# Altium schematic symbol library Connectors-LIB-SCH.SchLib: 36 symbols
Pins are listed as number, name and electrical type; pins without a type are passive.

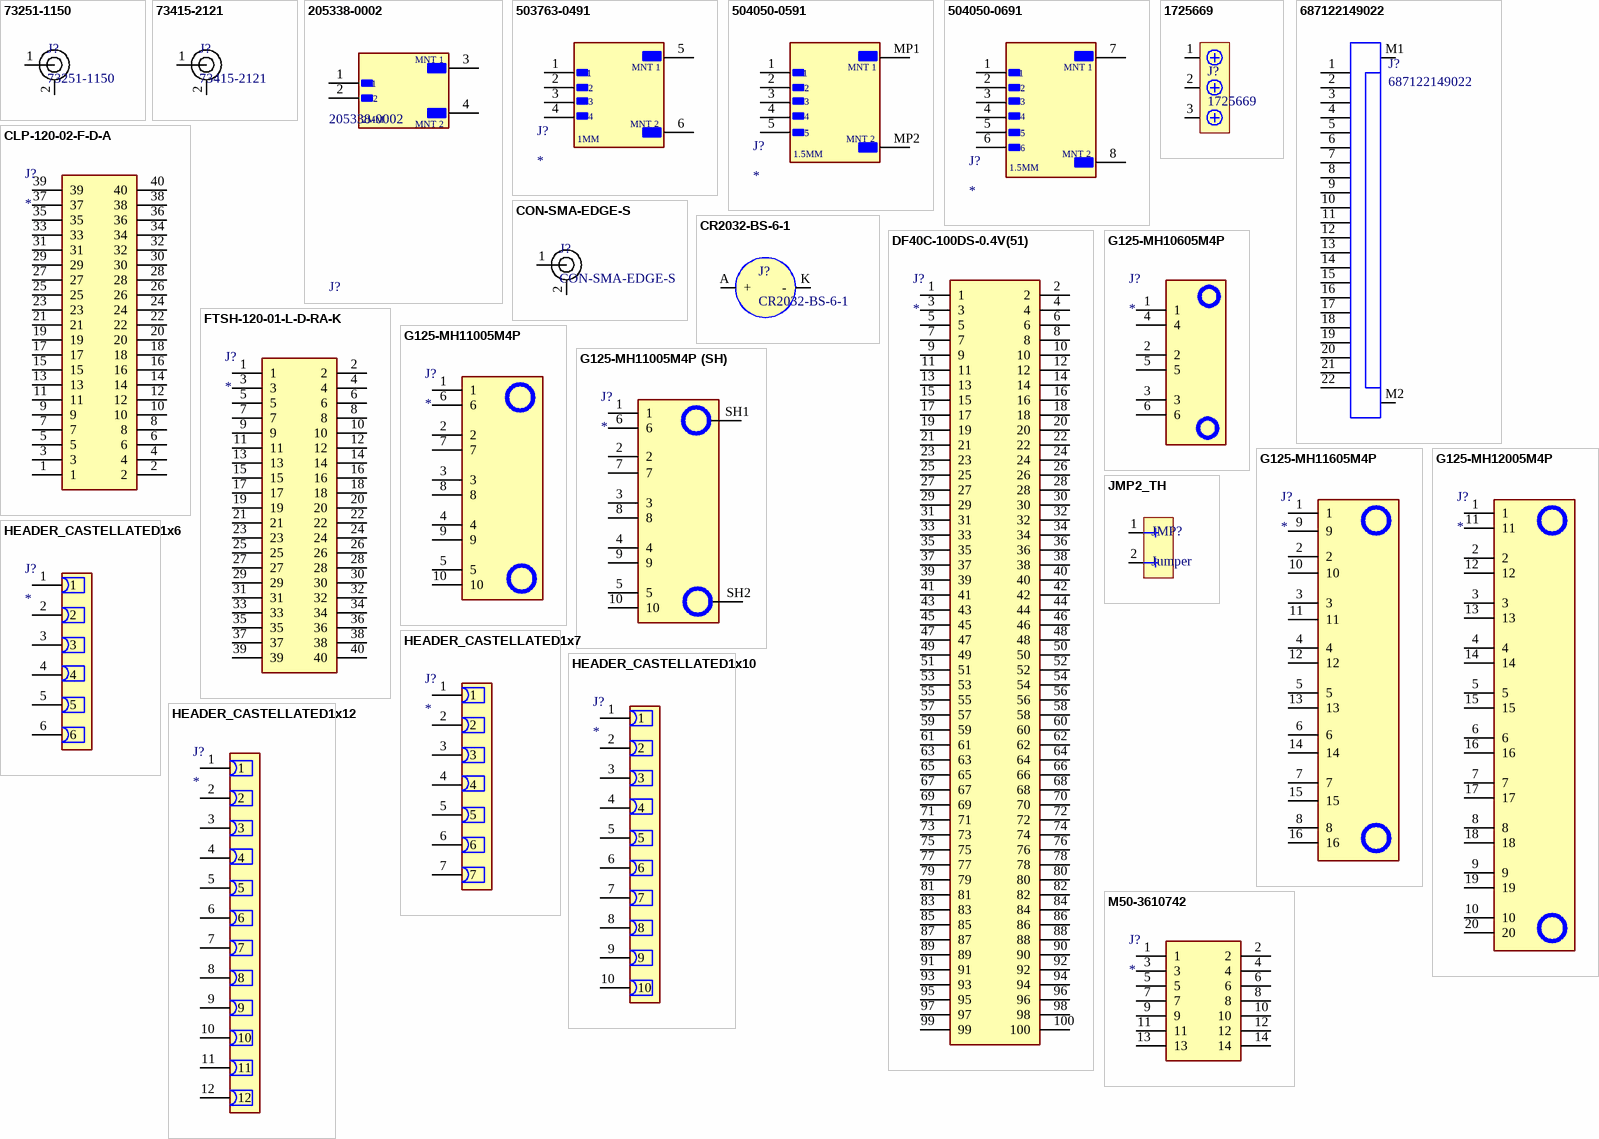
[diagram p0: symbols 73251-1150 to M50-3610742]

## 73251-1150
designator J?
RF Connector 50 Ohms, SMA Jack Receptacle, Edge Mount, .25µm Gold (Au) Plating; Manufacturer: Molex; Manufacturer Part Number: 73251-1150
footprint 73251-1150
pins: 1, 2

## 73415-2121
designator J?
RF Connector 50 Ohms, MMCX Vertical Plug, PCB, Plating Per Commercial Requirements, Bulk; Manufacturer: Molex; Manufacturer Part Number: 73415-2121
footprint 73415-2121
pins: 1, 2

## 205338-0002
designator J?
2.00 mm Pico-Lock Header, Surface-Mount, Right-Angle, Positive Lock, 2 Circuits (2 Positions); Manufacturer: Molex; Current Rating: 6.5A; Est Price INR: 163.37; Population Status: YES; Datasheet Link: https://www.molex.com/en-us/products/part-detail/2053380002?display=pdf; Height: 2.6mm; Manufacturer Part Number: 205338-0002; Package: SMD; Supplier Part Number: 538-205338-0002; Supplier: Mouser; Temperature Range: -40 to 105; Weight: 198.280 mg
footprint FP-205338-0002-MFG
pins: 1, 2, 3 MNT 1, 4 MNT 2
text: 2MM

## 503763-0491
designator J?
1.00 mm Pico-Lock Wire-to-Board Plug, Right-Angle, 4 Circuits (4 Positions), Positive Side Locking; Manufacturer: Molex; Manufacturer Part Number: 503763-0491; Est Price INR: 98.41; Population Status: YES; Current Rating: 1.5A; Datasheet Link: https://www.molex.com/webdocs/datasheets/pdf/en-us/5037630491_PCB_HEADERS.pdf; Height: 1.6mm; Supplier Part Number: 538-503763-0491; Package: SMD; Supplier: Mouser; Temperature Range: -40 to 105; Weight: 76.240 mg
footprint 5037630491
pins: 1, 2, 3, 4, 5, 6
text: MNT 1; MNT 2; 1MM

## 504050-0591
designator J?
1.50 mm Pico-Lock Header, Surface-Mount, Right-Angle, Positive Lock, 5 Circuits (5 Positions); Manufacturer: Molex; Manufacturer Part NUmber: 504050-0591; Current Rating: 2A; Est Price INR: 131.85; Population Status: YES; Datasheet Link: https://www.molex.com/pdm_docs/sd/5040500591_sd.pdf; Height: 2.15mm; Supplier Part Number: 538-504050-0591; Package: SMD; Supplier: Mouser; Temperature Range: -40 to 105; Weight: 143mg
footprint 5040500591
pins: 1, 2, 3, 4, 5, MP1 MP_1, MP2 MP_2
text: MNT 1; MNT 2; 1.5MM

## 504050-0691
designator J?
1.50 mm Pico-Lock Wire-to-Board Header Assembly, Embossed Tape Packaging, 6 Circuits (6 Positions); Manufacturer: Molex; Manufacturer Part NUmber: 504050-0691; Description: Pico-Lock SMT Wire-to-Board Header 6 way Molex Pico-Lock Series; Current Rating: 3A; Est Price INR: 144.27; Population Status: YES; Datasheet Link: https://www.molex.com/content/dam/molex/molex-dot-com/products/automated/en-us/salesdrawingpdf/504/504050/5040500691_sd.pdf?inline; Height: 2.15mm; Supplier Part Number: 538-504050-0691; Package: SMD; Supplier: Mouser; Temperature Range: -40 to 105; Weight: 3g
footprint 5040500691
pins: 1, 2, 3, 4, 5, 6, 7 MP_1, 8 MP_2
text: MNT 1; MNT 2; 1.5MM

## 1725669
designator J?
Screw Terminal Block 3 Positions 2.54mm; Manufacturer: Phoenix; Manufacturer Part Number: 1725669
footprint 1725669
pins: 1, 2, 3

## 687122149022
designator J?
22 Position FFC, FPC Connector Contacts, Bottom 0.020" (0.50mm) Surface Mount, Right Angle; Manufacturer: Wurth Elektronik; Current Rating: 500mA; Est Price INR: 159.34; Population Status: YES; Datasheet Link: https://www.we-online.com/components/products/datasheet/687122149022.pdf; Manufacturer Part Number: 687122149022; Package: SMD Horizontal 0.5mm 22Pos; Supplier Part Number: 710-687122149022; Supplier: Mouser; Temperature Range: -40 to 105; Weight: 341mg
footprint 687122149022 (0.50mm SMT ZIF Horizontal Hinge Type Bottom Contact, 22p)
pins: 1, 2, 3, 4, 5, 6, 7, 8, 9, 10, 11, 12, 13, 14, 15, 16, 17, 18, 19, 20, 21, 22, M1, M2

## CLP-120-02-F-D-A
designator J?
Connector; Manufacturer: SAMTEC; Manufacturer Part Number: CLP-120-02-F-D-A; Datasheet Link: http://suddendocs.samtec.com/prints/erm8-xxx-xx.x-xxx-dv-xxxx-xx-mkt.pdf; Height: 2.37mm; Supplier Part Number: 200-CLP12002FDA
footprint CLP-120-02-XXX-D-A
pins: 1, 2, 3, 4, 5, 6, 7, 8, 9, 10, 11, 12, 13, 14, 15, 16, 17, 18, 19, 20, 21, 22, 23, 24, 25, 26, 27, 28, 29, 30, 31, 32, 33, 34, 35, 36, 37, 38, 39, 40

## CON-SMA-EDGE-S
designator J?
RF Connector SMA Female 50 Ohms 18 GHz PCB Edge Mount; Manufacturer: RF Solutions; Manufacturer Part Number: CON-SMA-EDGE-S
footprint CON-SMA-EDGE-S
pins: 1, 2

## CR2032-BS-6-1
designator J?
CR2032 Coin Cell Battery Holder; Manufacturer: Q&J; Manufacturer Part Number: CR2032-BS-6-1
footprint CR2032
pins: A +, K -

## DF40C-100DS-0.4V(51)
designator J?
Board to Board & Mezzanine Connectors 100P SMT RECEPTACLE NO FITTING, NO BOSS; Manufacturer: Hirose; Manufacturer Part Number: DF40C-100DS-0.4V(51); Current Rating: 320mA; Population Status: YES; Est Price INR: 197.54; Datasheet Link: https://datasheet.datasheetarchive.com/originals/distributors/SFDatasheet-7/sf-000141247.pdf; Supplier Part Number: 798-DF40C100DS0.4V51; Package: 100Pos 0.4mm Pitch; Supplier: Mouser; Temperature Range: -35 to 85; Weight: 0.12g; Height: 1.45mm
footprint DF40C100DS04V51 (Footprint not found)
pins: 1, 2, 3, 4, 5, 6, 7, 8, 9, 10, 11, 12, 13, 14, 15, 16, 17, 18, 19, 20, 21, 22, 23, 24, 25, 26, 27, 28, 29, 30, 31, 32, 33, 34, 35, 36, 37, 38, 39, 40, 41, 42, 43, 44, 45, 46, 47, 48, 49, 50, 51, 52, 53, 54, 55, 56, 57, 58, 59, 60, 61, 62, 63, 64, 65, 66, 67, 68, 69, 70, 71, 72, 73, 74, 75, 76, 77, 78, 79, 80, 81, 82, 83, 84, 85, 86, 87, 88, 89, 90, 91, 92, 93, 94, 95, 96, 97, 98, 99, 100

## FTSH-120-01-L-D-RA-K
designator J?
Header Strips, .050" pitch; Manufacturer: SAMTEC; Manufacturer Part Number: FTSH-120-01-L-D-RA-K; Datasheet Link: http://suddendocs.samtec.com/prints/ftsh-1xx-xx-xxx-dv-xxx-xxx-mkt.pdf; Supplier Part Number: 200-FTSH12001LDRAK
footprint FTSH-120-XX-YYY-D-RA-K
pins: 1, 2, 3, 4, 5, 6, 7, 8, 9, 10, 11, 12, 13, 14, 15, 16, 17, 18, 19, 20, 21, 22, 23, 24, 25, 26, 27, 28, 29, 30, 31, 32, 33, 34, 35, 36, 37, 38, 39, 40

## G125-MH10605M4P
designator J?
Connector Header Through Hole, Right Angle 6 position 0.049" (1.25mm); Manufacturer: Harwin; Manufacturer Part Number: G125-MH10605M4P; Est Price INR: 1724.76; Population Status: YES; Current Rating: 2A; Datasheet Link: https://content.harwin.com/m/667f1be9427fb768/original/DRG-02921-Technical-Drawing-Datasheet-G125-MH1XX05M4P-pdf.pdf; Height: 5.3mm; Supplier Part Number: 855-G125MH1065M4PM4P; Package: TH 1.27mm 6Pos; Supplier: Mouser; Temperature Range: -60 to 150; Weight: 1.246g
footprint G125-MH10605M4P_1
pins: 1, 2, 3, 4, 5, 6

## G125-MH11005M4P
designator J?
Connector; Manufacturer: Harwin; Manufacturer Part Number: G125-MH11005M4P; Est Price INR: 2249.37; Population Status: YES; Current Rating: 2A; Datasheet Link: https://content.harwin.com/m/dde372ac2f9348fc/original/DRG-02922-Technical-Drawing-Datasheet-G125-MH1XX05M4R-pdf.pdf; Height: 5.3mm; Supplier Part Number: 855-G125MH1105M4PM4P; Package: 1.25mm TH 2x5pin; Supplier: Mouser; Temperature Range: -65 to 150; Weight: 1.344g
footprint G125-MH11005M4P_1
pins: 1, 2, 3, 4, 5, 6, 7, 8, 9, 10

## G125-MH11005M4P (SH)
designator J?
Connector; Manufacturer: Harwin; Manufacturer Part Number: G125-MH11605M4R; Datasheet Link: https://content.harwin.com/m/dde372ac2f9348fc/original/DRG-02922-Technical-Drawing-Datasheet-G125-MH1XX05M4R-pdf.pdf; Height: 5.3mm; Supplier Part Number: 855-G125MH1165M4RM4R
footprint G125-MH11005M4P_SH
pins: 1, 2, 3, 4, 5, 6, 7, 8, 9, 10, SH1, SH2

## G125-MH11605M4P
designator J?
Headers & Wire Housings Gecko-SL 8+8 Pos. Male Plug DIL Right-Angle 3.2mm THT Connector, Screw-Lok Board Mount; Manufacturer: Harwin; Manufacturer Part Number: G125-MH11605M4P; Est Price INR: 2402.18; Population Status: YES; Current Rating: 2A; Datasheet Link: https://content.harwin.com/m/dde372ac2f9348fc/original/DRG-02922-Technical-Drawing-Datasheet-G125-MH1XX05M4P-pdf.pdf; Height: 5.3mm; Supplier Part Number: 855-G125MH1165M4PM4P; Package: 1.25mm TH 2x8Pin; Supplier: Mouser; Temperature Range: -65 to 150; Weight: 1.49g
footprint G125-MH11605M4R
pins: 1, 2, 3, 4, 5, 6, 7, 8, 9, 10, 11, 12, 13, 14, 15, 16

## G125-MH12005M4P
designator J?
Connector Header Through Hole, Right Angle 20 position 0.049" (1.25mm); Manufacturer: Harwin; Manufacturer Part Number: G125-MH12005M4P; Est Price INR: 2428.27; Population Status: YES; Current Rating: 2A; Datasheet Link: https://content.harwin.com/m/667f1be9427fb768/original/DRG-02921-Technical-Drawing-Datasheet-G125-MH1XX05M4P-pdf.pdf; Height: 5.3mm; Supplier Part Number: 855-G125MH1205M4PM4P; Package: 1.27mm TH 2x10Pin; Supplier: Mouser; Temperature Range: -65 to 150; Weight: 1.587g
footprint G125-MH12005M4P_1
pins: 1, 2, 3, 4, 5, 6, 7, 8, 9, 10, 11, 12, 13, 14, 15, 16, 17, 18, 19, 20

## HEADER_CASTELLATED1x6
designator J?
Castellated Header 1x6 pins 2.54mm Pitch; Package: 2.54mm 1x6pins
footprint HEADER_CASTELLATED_1x6 (Footprint not found)
pins: 1, 2, 3, 4, 5, 6

## HEADER_CASTELLATED1x7
designator J?
Castellated Header 1x7 pins 2.54mm Pitch; Package: 2.54mm 1x7pins
footprint HEADER_CASTELLATED_1x7
pins: 1, 2, 3, 4, 5, 6, 7

## HEADER_CASTELLATED1x10
designator J?
Castellated Header 1x10 pins 2.54mm Pitch; Package: 2.54mm 1x10pins
footprint HEADER_CASTELLATED_1x10
pins: 1, 2, 3, 4, 5, 6, 7, 8, 9, 10

## HEADER_CASTELLATED1x12
designator J?
Castellated Header 1x10 pins 2.54mm Pitch; Package: 2.54mm 1x10pins
footprint HEADER_CASTELLATED_1x12
pins: 1, 2, 3, 4, 5, 6, 7, 8, 9, 10, 11, 12

## JMP2_TH
designator JMP?, comment Jumper
Jumper 2 Pins Through-Hole DO NOT PLACE
footprint JMP2_TH
pins: 1, 2

## M50-3610742
designator J?
Connector; Manufacturer: Harwin; Manufacturer Part Number: M50-3610742; Datasheet Link: https://content.harwin.com/m/023beacb372da894/original/DRG-00659-Technical-Drawing-Datasheet-M50-361-pdf.pdf; Height: 4.68mm; Supplier Part Number: 855-M50-3610742
footprint M50-3610742 (Footprint not found)
pins: 1, 2, 3, 4, 5, 6, 7, 8, 9, 10, 11, 12, 13, 14

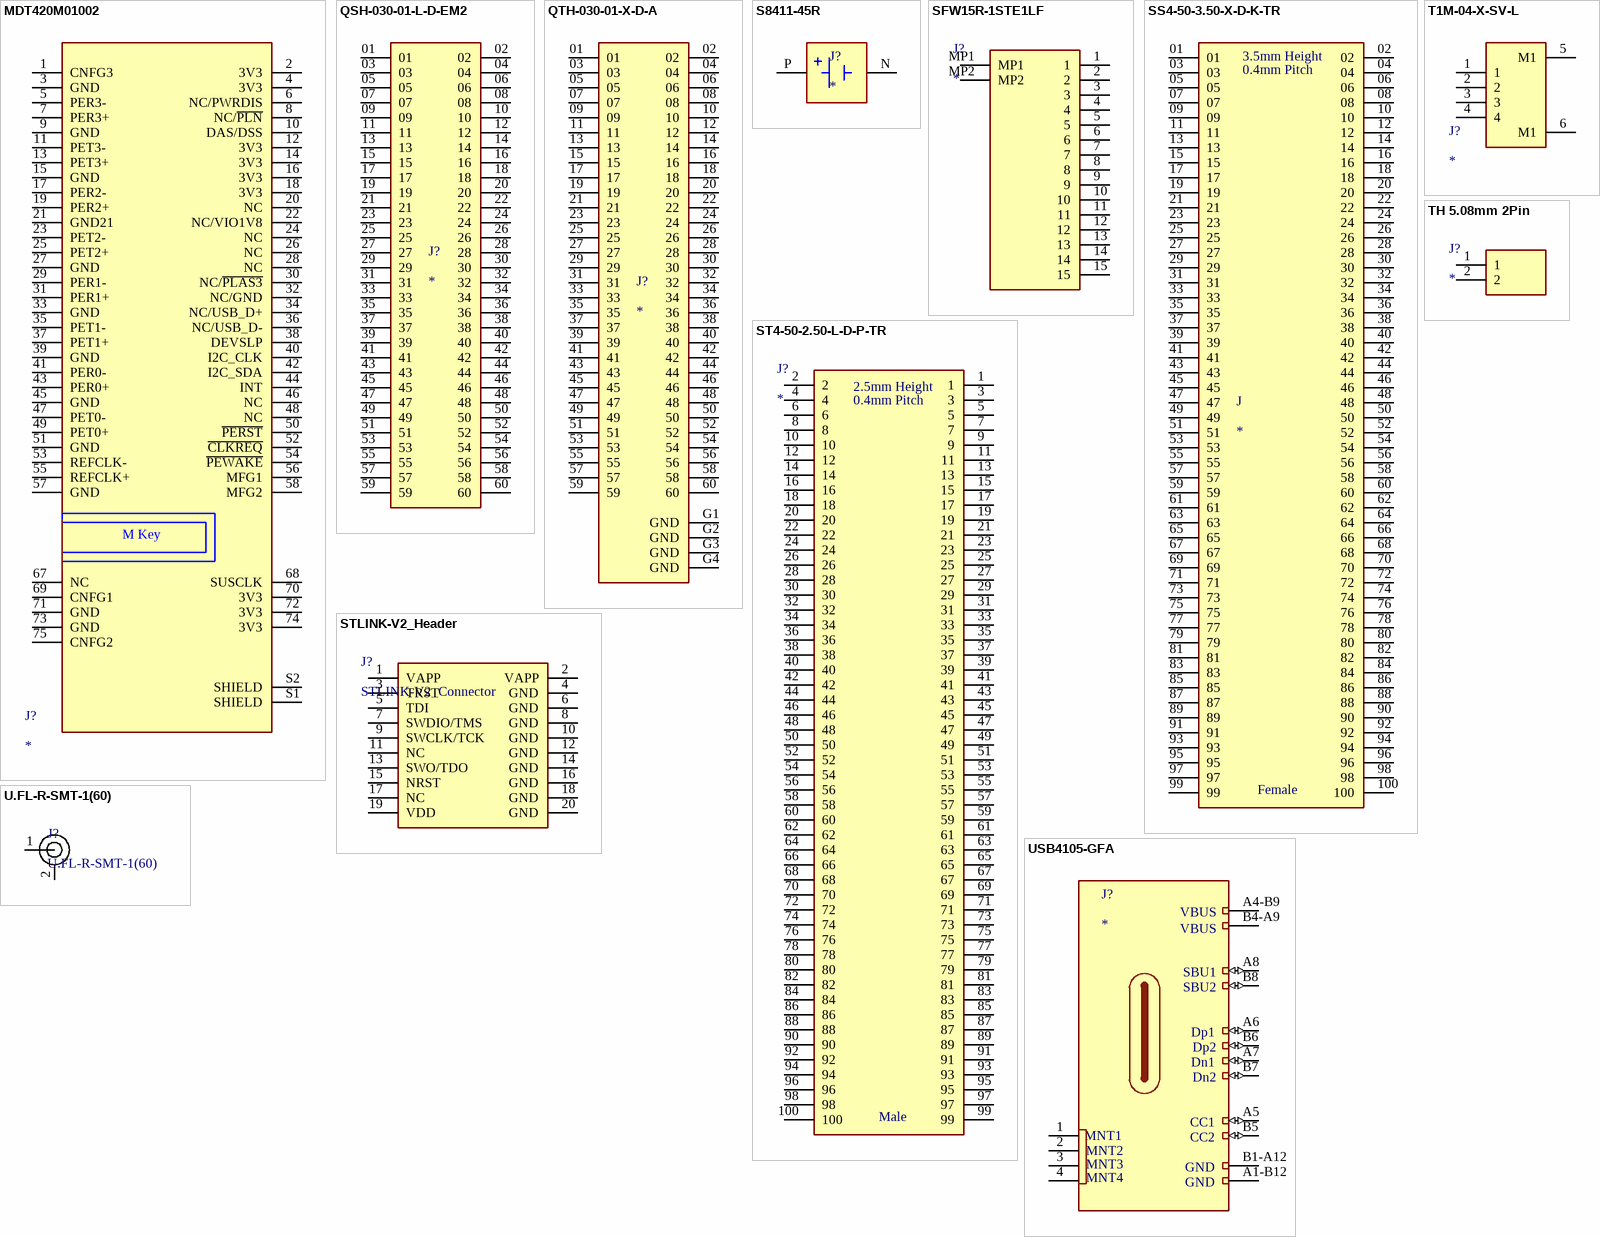
[diagram p1: symbols MDT420M01002 to USB4105-GFA]

## MDT420M01002
designator J?
67 Position Female Connector M.2 (NGFF) Mini Card Gold 0.020" (0.50mm) Black; Manufacturer Part Number: MDT420M01002; Manufacturer: Amphenol FCI; Current Rating: 500mA; Est Price INR: 250.65; Population Status: YES; Package: M.2 (NGFF) Mini Card; Datasheet Link: https://cdn.amphenol-cs.com/media/wysiwyg/files/drawing/cmdt420xxx002.pdf; Supplier Part Number: 523-MDT420M03001; Supplier: Mouser; Temperature Range: -40 to 80; Weight: 2.026 g
footprint AMPHENOL_MDT420M01002
pins: 1 CNFG3, 2 3V3, 3 GND (power), 4 3V3, 5 PER3-, 6 NC/PWRDIS, 7 PER3+, 8 NC/~{PLN}, 9 GND (power), 10 DAS/DSS, 11 PET3-, 12 3V3, 13 PET3+, 14 3V3, 15 GND (power), 16 3V3, 17 PER2-, 18 3V3, 19 PER2+, 20 NC, 21 GND21 (power), 22 NC/VIO1V8, 23 PET2-, 24 NC, 25 PET2+, 26 NC, 27 GND (power), 28 NC, 29 PER1-, 30 NC/~{PLAS3}, 31 PER1+, 32 NC/GND, 33 GND (power), 34 NC/USB_D+, 35 PET1-, 36 NC/USB_D-, 37 PET1+, 38 DEVSLP, 39 GND (power), 40 I2C_CLK, 41 PER0-, 42 I2C_SDA, 43 PER0+, 44 INT, 45 GND (power), 46 NC, 47 PET0-, 48 NC, 49 PET0+, 50 ~{PERST}, 51 GND (power), 52 ~{CLKREQ}, 53 REFCLK-, 54 ~{PEWAKE}, 55 REFCLK+, 56 MFG1, 57 GND (power), 58 MFG2, 67 NC, 68 SUSCLK, 69 CNFG1, 70 3V3, 71 GND, 72 3V3, 73 GND, 74 3V3, 75 CNFG2, S1 SHIELD, S2 SHIELD
text: M Key

## QSH-030-01-L-D-EM2
designator J?
0.50 mm Q Strip® High-Speed Ground Plane Socket Strip 60pos; Manufacturer: Samtec Inc.; Manufacturer Part Number: QSH-030-01-X-D-EM2; Est Price INR: None; Package: None
footprint SAMTEC_QSH-030-01-X-D-EM2 - duplicate
pins: 01, 02, 03, 04, 05, 06, 07, 08, 09, 10, 11, 12, 13, 14, 15, 16, 17, 18, 19, 20, 21, 22, 23, 24, 25, 26, 27, 28, 29, 30, 31, 32, 33, 34, 35, 36, 37, 38, 39, 40, 41, 42, 43, 44, 45, 46, 47, 48, 49, 50, 51, 52, 53, 54, 55, 56, 57, 58, 59, 60

## QTH-030-01-X-D-A
designator J?
0.50 mm Q Strip® High-Speed Ground Plane Terminal Strip 60pos; Manufacturer Part Number: QTH-030-01-X-D-A; Manufacturer: Samtec; Est Price INR: None; Package: None
footprint SAMTEC-QTH-030-01-X-D-A
pins: 01, 02, 03, 04, 05, 06, 07, 08, 09, 10, 11, 12, 13, 14, 15, 16, 17, 18, 19, 20, 21, 22, 23, 24, 25, 26, 27, 28, 29, 30, 31, 32, 33, 34, 35, 36, 37, 38, 39, 40, 41, 42, 43, 44, 45, 46, 47, 48, 49, 50, 51, 52, 53, 54, 55, 56, 57, 58, 59, 60, G1 GND (power), G2 GND (power), G3 GND (power), G4 GND (power)

## S8411-45R
designator J?
Coin Cell Battery Retainer, Horizontal SMT, for CR1220 Coin Cell Batteries, Tape & Reeled; Manufacturer: Harwin; Manufacturer Part Number: S8411-45R; Est Price INR: 135.11; Population Status: YES; Package: None; Supplier: Mouser; Temperature Range: -55 to 105; Supplier Part Number: 855-S8411-45R; Weight: 1.5g
footprint HARWIN_S8411-45R
pins: N NEG, P POS

## SFW15R-1STE1LF
designator J?
Connector; Manufacturer: Amphenol Communications Solutions; Manufacturer Part Number: SFW15R-1STE1LF; Datasheet Link: https://cdn.amphenol-cs.com/media/wysiwyg/files/drawing/sfw12lf.pdf; Height: 2.9mm
footprint SFW15R1STE1LF
pins: 1, 2, 3, 4, 5, 6, 7, 8, 9, 10, 11, 12, 13, 14, 15, MP1, MP2

## SS4-50-3.50-X-D-K-TR
designator J
100 Position Connector Socket, Female, 3.5mm, 0.4mm pitch; Manufacturer Part Number: SS4-50-3.50-L-D-K-TR; Manufacturer: Samtec; Est Price INR: None; Package: None
footprint SS450350XDKTR
pins: 01, 02, 03, 04, 05, 06, 07, 08, 09, 10, 11, 12, 13, 14, 15, 16, 17, 18, 19, 20, 21, 22, 23, 24, 25, 26, 27, 28, 29, 30, 31, 32, 33, 34, 35, 36, 37, 38, 39, 40, 41, 42, 43, 44, 45, 46, 47, 48, 49, 50, 51, 52, 53, 54, 55, 56, 57, 58, 59, 60, 61, 62, 63, 64, 65, 66, 67, 68, 69, 70, 71, 72, 73, 74, 75, 76, 77, 78, 79, 80, 81, 82, 83, 84, 85, 86, 87, 88, 89, 90, 91, 92, 93, 94, 95, 96, 97, 98, 99, 100
text: 3.5mm Height; 0.4mm Pitch; Female

## ST4-50-2.50-L-D-P-TR
designator J?
100 Position Connector Socket, Male, 2.5mm, 0.4mm pitch; Manufacturer: SAMTEC; Manufacturer Part Number: ST4-50-2.50-L-D-P-TR; Datasheet Link: https://suddendocs.samtec.com/prints/st4-xx-x.xx-x-d-x-xx-xr-mkt.pdf?_gl=1*p4lnnt*_gcl_aw*R0NMLjE3NjE1NzQ2MjguQ2owS0NRandzUHpIQmhEQ0FSSXNBTGxXTkcxNXNuS3NPREZ4VFBkN05NNENWczY4WndtMDF2UGI2VEtOYkllSGM0RVM4cXlLYUEtekt3QWFBdmQ1RUFMd193Y0I.*_gcl_au*MTYyNTE0NzM4; Height: 5.18mm; Supplier Part Number: 200-ST4502.50LDPTR
footprint ST450250LDPTR
pins: 1, 2, 3, 4, 5, 6, 7, 8, 9, 10, 11, 12, 13, 14, 15, 16, 17, 18, 19, 20, 21, 22, 23, 24, 25, 26, 27, 28, 29, 30, 31, 32, 33, 34, 35, 36, 37, 38, 39, 40, 41, 42, 43, 44, 45, 46, 47, 48, 49, 50, 51, 52, 53, 54, 55, 56, 57, 58, 59, 60, 61, 62, 63, 64, 65, 66, 67, 68, 69, 70, 71, 72, 73, 74, 75, 76, 77, 78, 79, 80, 81, 82, 83, 84, 85, 86, 87, 88, 89, 90, 91, 92, 93, 94, 95, 96, 97, 98, 99, 100
text: 2.5mm Height; 0.4mm Pitch; Male

## STLINK-V2_Header
designator J?, comment STLINK-V2_Connector
Connector; Manufacturer: 3M; Manufacturer Part Number: N2520-6002-RB; Datasheet Link: http://multimedia.3m.com/mws/media/330367O/3m-four-wall-header-2500-series-ts-0770.pdf; Height: 9.91mm
footprint SHDR20W64P254_2X10_3272X859X991P
pins: 1 VAPP, 2 VAPP, 3 TRST, 4 GND, 5 TDI, 6 GND, 7 SWDIO/TMS, 8 GND, 9 SWCLK/TCK, 10 GND, 11 NC, 12 GND, 13 SWO/TDO, 14 GND, 15 NRST, 16 GND, 17 NC, 18 GND, 19 VDD, 20 GND

## T1M-04-X-SV-L
designator J?
Connector Header Surface Mount 4 position 0.039" (1.00mm); Manufacturer Part Number: T1M-04-F-SV-L; Manufacturer: Samtec; Current Rating: 3.3A; Est Price INR: 166.79; Population Status: YES; Package: 1mm pitch 4Pos SMD; Datasheet Link: https://www.mouser.in/datasheet/3/85/1/t1m_sx.pdf; Height: 5.5mm; Supplier Part Number: 200-T1M04FSVL; Supplier: Mouser; Temperature Range: -55 to 125; Weight: 1.23g
footprint SAMTEC_T1M-04-X-SV-L
pins: 1, 2, 3, 4, 5 M1, 6 M1

## TH 5.08mm 2Pin
designator J?
Connector; Manufacturer: Multicomp Pro; Manufacturer Part Number: MC000048; Datasheet Link: http://www.farnell.com/datasheets/3186341.pdf; Height: 14.3mm
footprint MC000048
pins: 1, 2

## U.FL-R-SMT-1(60)
designator J?
RF Connector u.FL 50 Ohms 6 GHz; Manufacturer: Hirose Connector; Manufacturer Part Number: U.FL-R-SMT-1(60)
footprint U.FL-R-SMT-1(60)
pins: 1, 2

## USB4105-GFA
designator J?
USB Connectors USB Type C,2.0, Rec,SMT, 0.95mmTH Shell Stakes,G/F,RA,Top Mnt,T&R; Manufacturer Part Number: USB4105-GF-A; Manufacturer: GCT; Est Price INR: 86.66; Population Status: YES; Current Rating: 5A; Package: Right Angle SMD; Supplier: Mouser; Temperature Range: -40 to 85; Supplier Part Number: 640-USB4105-GF-A; Weight: 768mg; Datasheet Link: https://www.mouser.com/catalog/specsheets/Global_Connector_Technology_usb4105.pdf
footprint FP-USB4105-GF-A-MFG
pins: 1 MNT 1, 2 MNT 2, 3 MNT 3, 4 MNT 4, A1-B12 GND, A4-B9 VBUS (power), A5 CC1 (io), A6 Dp1 (io), A7 Dn1 (io), A8 SBU1 (io), B1-A12 GND, B4-A9 VBUS (power), B5 CC2 (io), B6 Dp2 (io), B7 Dn2 (io), B8 SBU2 (io)
text: MNT1; MNT2; MNT3; MNT4